# Altium integrated library S4B-PH-K-S__LF__SN_.IntLib: 1 symbol
Pins are listed as number, name and electrical type; pins without a type are passive.

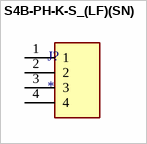
[diagram p0: symbol S4B-PH-K-S_(LF)(SN)]

## S4B-PH-K-S_(LF)(SN)
designator J?
Connector Header Through Hole, Right Angle 4 position 0.079 (2.00mm); MF: JST Sales; MP: S4B-PH-K-S (LF)(SN); SnapEDA_Link: https://www.snapeda.com/parts/S4B-PH-K-S%20(LF)(SN)/JST/view-part/?ref=snap; Package: NON STANDARD-4 J.S.T.; Value: *; Check_prices: https://www.snapeda.com/parts/S4B-PH-K-S%20(LF)(SN)/JST/view-part/?ref=eda
footprint JST_S4B-PH-K-S(LF)(SN)
pins: 1, 2, 3, 4